# Altium schematic symbol library LM393.SchLib: 1 symbol
Pins are listed as number, name and electrical type; pins without a type are passive.

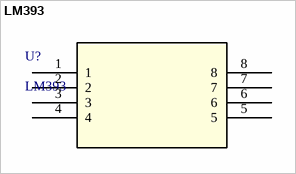
[diagram p0: symbol LM393]

## LM393
designator U?
Description; Manufacturer_Name: Texas Instruments; Copyright: Copyright (C) 2025 Ultra Librarian. All rights reserved.; Manufacturer_Part_Number: LM393; RefDes: RefDes; Type: Type
footprint DIP8_300
pins: 1, 2, 3, 4, 5, 6, 7, 8